# Altium footprint library AMPHENOL_62684-5511N0AHLF.PcbLib: 1 footprints
Each footprint in its own frame and in the unit in brackets; x right, y up, seen from the top. Pads: shape width x height; smd on the part's side, far side on the other; paste and mask are expansions set on the pad; w line width, h text height; cw(c..) or ccw(c..) is an arc to the next point about the centre after c.
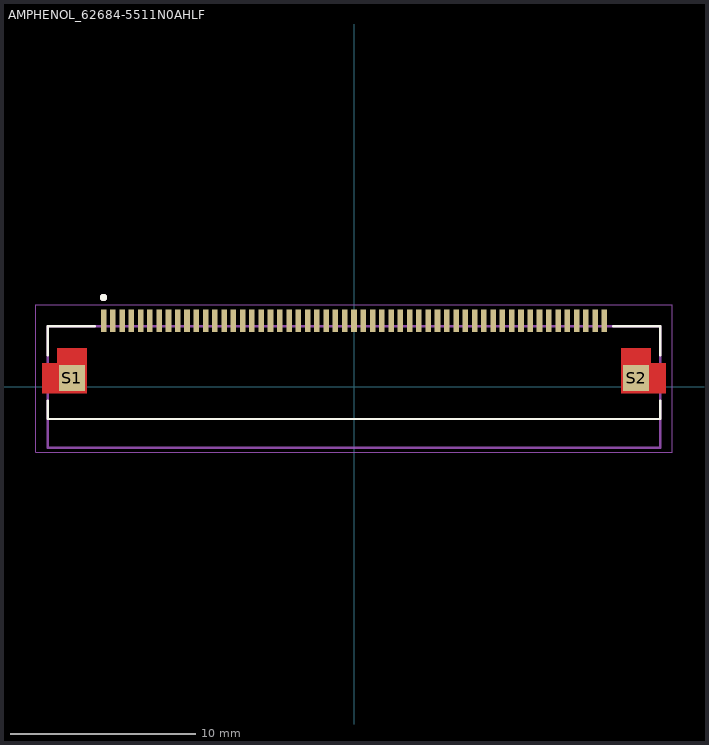
[diagram p0: the footprint, top view; thin cyan lines are the x and y axes]

## AMPHENOL_62684-5511N0AHLF [mm]
height 2
pads (57):
  rect 0.3x1.2 smd paste+0 mask+0.102: 01(-13.5,3.575) 02(-13,3.575) 03(-12.5,3.575) 04(-12,3.575) 05(-11.5,3.575) 06(-11,3.575) 07(-10.5,3.575) 08(-10,3.575) 09(-9.5,3.575) 10(-9,3.575) 11(-8.5,3.575) 12(-8,3.575) 13(-7.5,3.575) 14(-7,3.575) 15(-6.5,3.575) 16(-6,3.575) 17(-5.5,3.575) 18(-5,3.575) 19(-4.5,3.575) 20(-4,3.575) 21(-3.5,3.575) 22(-3,3.575) 23(-2.5,3.575) 24(-2,3.575) 25(-1.5,3.575) 26(-1,3.575) 27(-0.5,3.575) 28(0,3.575) 29(0.5,3.575) 30(1,3.575) 31(1.5,3.575) 32(2,3.575) 33(2.5,3.575) 34(3,3.575) 35(3.5,3.575) 36(4,3.575) 37(4.5,3.575) 38(5,3.575) 39(5.5,3.575) 40(6,3.575) 41(6.5,3.575) 42(7,3.575) 43(7.5,3.575) 44(8,3.575) 45(8.5,3.575) 46(9,3.575) 47(9.5,3.575) 48(10,3.575) 49(10.5,3.575) 50(11,3.575) 51(11.5,3.575) 52(12,3.575) 53(12.5,3.575) 54(13,3.575) 55(13.5,3.575)
  rect 1.4x1.4 smd paste-2 mask+0: S1(-15.2,0.475) S2(15.2,0.475)
Top Layer:
  region: 16,1.275 16.8,1.275 16.8,-0.325 14.4,-0.325 14.4,2.075 16,2.075
  region: -14.4,-0.325 -16.8,-0.325 -16.8,1.275 -16,1.275 -16,2.075 -14.4,2.075
Top Overlay:
  circle w0.2: c-13.5,4.825 r0.1
  lines w0.127: -16.5,-0.745 -16.5,-1.725 16.5,-1.725 16.5,-0.745 ; -16.5,1.695 -16.5,3.275 -13.97,3.275 ; 13.97,3.275 16.5,3.275 16.5,1.695
Top Paste:
  region: -14.4,-0.325 -16.8,-0.325 -16.8,1.275 -16,1.275 -16,2.075 -14.4,2.075
  region: 16,1.275 16.8,1.275 16.8,-0.325 14.4,-0.325 14.4,2.075 16,2.075
Top Solder:
  region: -14.3,-0.425 -16.9,-0.425 -16.9,1.375 -16.1,1.375 -16.1,2.175 -14.3,2.175
  region: 16.1,1.375 16.9,1.375 16.9,-0.425 14.3,-0.425 14.3,2.175 16.1,2.175
Assembly Top:
  circle w0.2: c-13.5,4.825 r0.1
  lines w0.127: -16.5,-3.275 16.5,-3.275 16.5,3.275 -16.5,3.275 -16.5,-3.275
Courtyard Top:
  lines w0.05: -17.15,-3.525 -17.15,4.425 17.15,4.425 17.15,-3.525 -17.15,-3.525
3D body "step_temp.STEP": height 2, standoff 0, extent -16.5,-2.8 16.5,2.8